# Altium integrated library PDS5100-13.IntLib: 1 symbol
Pins are listed as number, name and electrical type; pins without a type are passive.

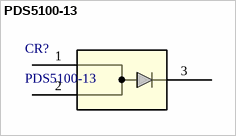
[diagram p0: symbol PDS5100-13]

## PDS5100-13
designator CR?
Description; Manufacturer_Name: Diodes Inc; Copyright: Copyright (C) 2026 Ultra Librarian. All rights reserved.; Manufacturer_Part_Number: PDS5100-13; RefDes: RefDes; Type: Type
footprint PDS5100_DIO
pins: 1, 2, 3